# Altium footprint library QuarterBridge_verL.PcbLib: 15 footprints
Each footprint in its own frame and in the unit in brackets; x right, y up, seen from the top. Pads: shape width x height; smd on the part's side, far side on the other; paste and mask are expansions set on the pad; w line width, h text height; cw(c..) or ccw(c..) is an arc to the next point about the centre after c.
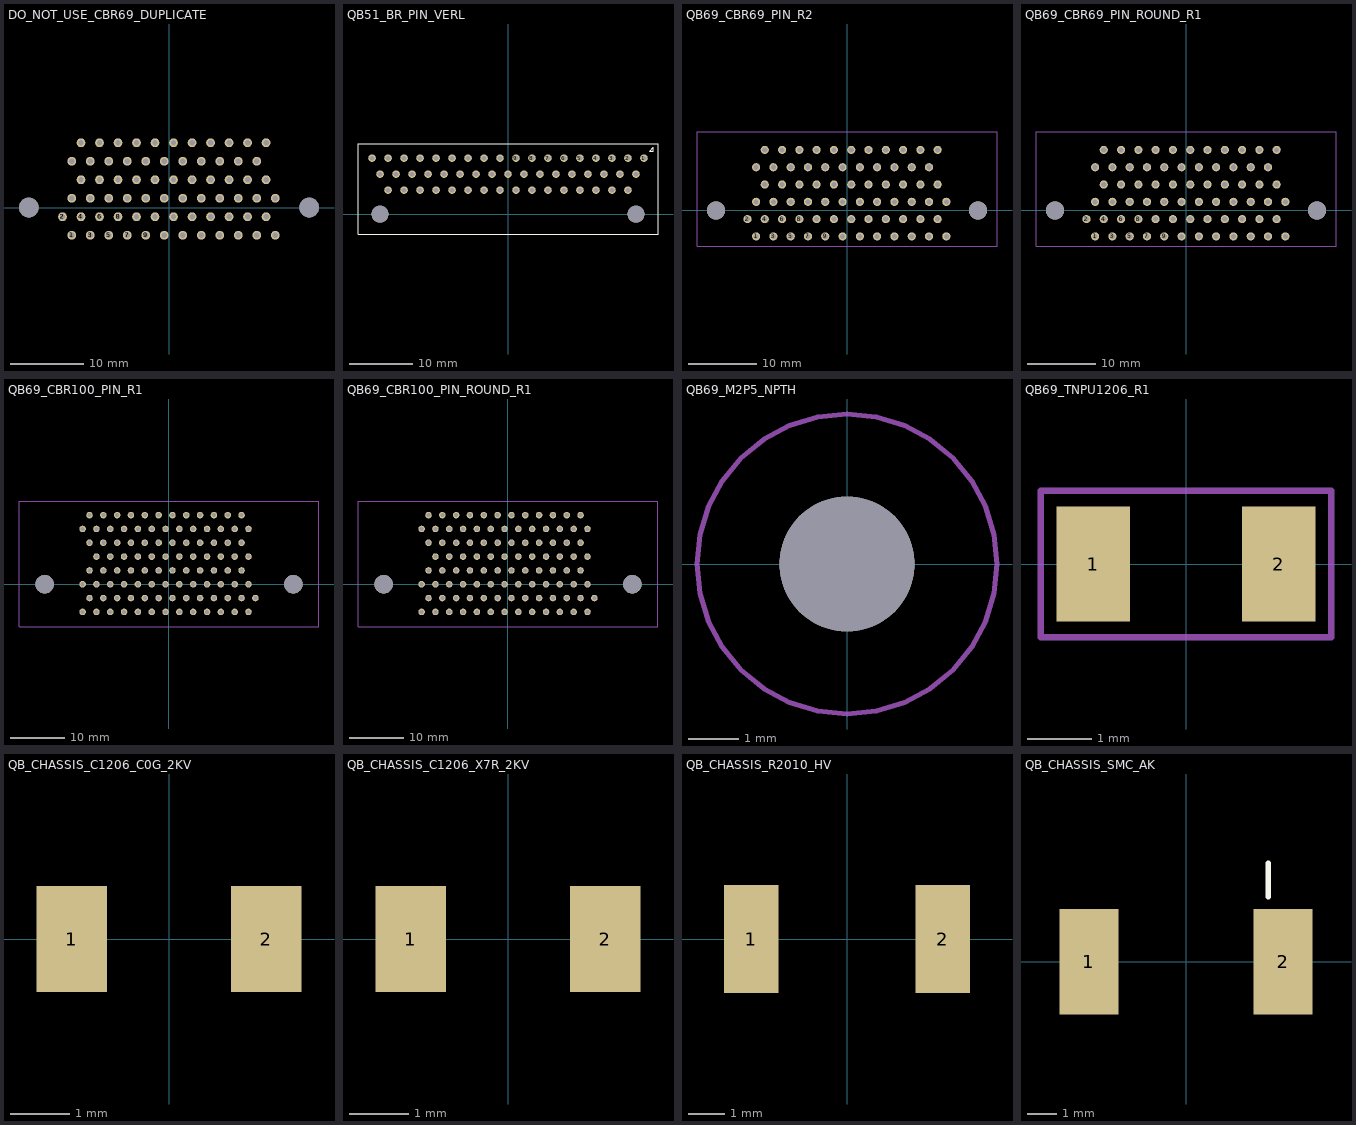
[diagram p0: the footprints below, top view; thin cyan lines are the x and y axes]

## DO_NOT_USE_CBR69_DUPLICATE [mm] "CATALOG PIN draft; component-side view; drill sizes provisional"
pads (142):
  round 1.2 hole 0.75 mask+0.05: 1(-13.35,-3.81) 1(-13.35,-3.81) 2(-14.62,-1.27) 2(-14.62,-1.27) 3(-10.81,-3.81) 3(-10.81,-3.81) 4(-12.08,-1.27) 4(-12.08,-1.27) 5(-8.27,-3.81) 5(-8.27,-3.81) 6(-9.54,-1.27) 6(-9.54,-1.27) 7(-5.73,-3.81) 7(-5.73,-3.81) 8(-7,-1.27) 8(-7,-1.27) 9(-3.19,-3.81) 9(-3.19,-3.81) 10(-4.46,-1.27) 10(-4.46,-1.27) 11(-0.65,-3.81) 11(-0.65,-3.81) 12(-1.92,-1.27) 12(-1.92,-1.27) 13(1.89,-3.81) 13(1.89,-3.81) 14(0.62,-1.27) 14(0.62,-1.27) 15(4.43,-3.81) 15(4.43,-3.81) 16(3.16,-1.27) 16(3.16,-1.27) 17(6.97,-3.81) 17(6.97,-3.81) 18(5.7,-1.27) 18(5.7,-1.27) 19(9.51,-3.81) 19(9.51,-3.81) 20(8.24,-1.27) 20(8.24,-1.27) 21(12.05,-3.81) 21(12.05,-3.81) 22(10.78,-1.27) 22(10.78,-1.27) 23(14.59,-3.81) 23(14.59,-3.81) 24(13.32,-1.27) 24(13.32,-1.27) 25(-13.35,1.27) 25(-13.35,1.27) 26(-12.08,3.81) 26(-12.08,3.81) 27(-10.81,1.27) 27(-10.81,1.27) 28(-9.54,3.81) 28(-9.54,3.81) 29(-8.27,1.27) 29(-8.27,1.27) 30(-7,3.81) 30(-7,3.81) 31(-5.73,1.27) 31(-5.73,1.27) 32(-4.46,3.81) 32(-4.46,3.81) 33(-3.19,1.27) 33(-3.19,1.27) 34(-1.92,3.81) 34(-1.92,3.81) 35(-0.65,1.27) 35(-0.65,1.27) 36(0.62,3.81) 36(0.62,3.81) 37(1.89,1.27) 37(1.89,1.27) 38(3.16,3.81) 38(3.16,3.81) 39(4.43,1.27) 39(4.43,1.27) 40(5.7,3.81) 40(5.7,3.81) 41(6.97,1.27) 41(6.97,1.27) 42(8.24,3.81) 42(8.24,3.81) 43(9.51,1.27) 43(9.51,1.27) 44(10.78,3.81) 44(10.78,3.81) 45(12.05,1.27) 45(12.05,1.27) 46(13.32,3.81) 46(13.32,3.81) 47(14.59,1.27) 47(14.59,1.27) 48(-12.08,8.89) 48(-12.08,8.89) 49(-13.35,6.35) 49(-13.35,6.35) 50(-9.54,8.89) 50(-9.54,8.89) 51(-10.81,6.35) 51(-10.81,6.35) 52(-7,8.89) 52(-7,8.89) 53(-8.27,6.35) 53(-8.27,6.35) 54(-4.46,8.89) 54(-4.46,8.89) 55(-5.73,6.35) 55(-5.73,6.35) 56(-1.92,8.89) 56(-1.92,8.89) 57(-3.19,6.35) 57(-3.19,6.35) 58(0.62,8.89) 58(0.62,8.89) 59(-0.65,6.35) 59(-0.65,6.35) 60(3.16,8.89) 60(3.16,8.89) 61(1.89,6.35) 61(1.89,6.35) 62(5.7,8.89) 62(5.7,8.89) 63(4.43,6.35) 63(4.43,6.35) 64(8.24,8.89) 64(8.24,8.89) 65(6.97,6.35) 65(6.97,6.35) 66(10.78,8.89) 66(10.78,8.89) 67(9.51,6.35) 67(9.51,6.35) 68(13.32,8.89) 68(13.32,8.89) 69(12.05,6.35) 69(12.05,6.35)
  round 2.7 hole 2.7 unplated mask+0: ""(-19.24,0) ""(-19.24,0) ""(19.24,0) ""(19.24,0)

## EMPTY_RESERVED [mm] "Empty placeholder"

## EMPTY_RESERVED_MOUNT [mm] "Empty commit placeholder"

## PCBComponent_1 [mm]

## QB51_BR_PIN_VERL [mm] "BR 51 male M83513/17; 18/17/16 rows; PCB mount pitch40.64mm; per annotated user pattern"
height 8.92
pads (53):
  round 1.2 hole 0.75 mask+0.05: 1(21.59,8.89) 2(19.05,8.89) 3(16.51,8.89) 4(13.97,8.89) 5(11.43,8.89) 6(8.89,8.89) 7(6.35,8.89) 8(3.81,8.89) 9(1.27,8.89) 10(-1.27,8.89) 11(-3.81,8.89) 12(-6.35,8.89) 13(-8.89,8.89) 14(-11.43,8.89) 15(-13.97,8.89) 16(-16.51,8.89) 17(-19.05,8.89) 18(-21.59,8.89) 19(20.32,6.35) 20(17.78,6.35) 21(15.24,6.35) 22(12.7,6.35) 23(10.16,6.35) 24(7.62,6.35) 25(5.08,6.35) 26(2.54,6.35) 27(0,6.35) 28(-2.54,6.35) 29(-5.08,6.35) 30(-7.62,6.35) 31(-10.16,6.35) 32(-12.7,6.35) 33(-15.24,6.35) 34(-17.78,6.35) 35(-20.32,6.35) 36(19.05,3.81) 37(16.51,3.81) 38(13.97,3.81) 39(11.43,3.81) 40(8.89,3.81) 41(6.35,3.81) 42(3.81,3.81) 43(1.27,3.81) 44(-1.27,3.81) 45(-3.81,3.81) 46(-6.35,3.81) 47(-8.89,3.81) 48(-11.43,3.81) 49(-13.97,3.81) 50(-16.51,3.81) 51(-19.05,3.81)
  round 2.7 hole 2.7 unplated mask+0: ""(-20.32,0) ""(20.32,0)
Top Overlay:
  lines w0.12: -23.815,-3.175 -23.815,11.175 23.815,11.175 23.815,-3.175 -23.815,-3.175 ; 22.5,10 23.1,10 23.1,10.6 22.5,10
3D body "QB51_BR_REFERENCE.step": height 8.92, standoff -3.56, extent -23.815,-3.175 23.815,11.175

## QB69_CBR69_PIN_R2 [mm] "PIN component-side draft"
height 8.92
pads (71):
  round 1.2 hole 0.75 mask+0.05: 1(-13.35,-3.81) 2(-14.62,-1.27) 3(-10.81,-3.81) 4(-12.08,-1.27) 5(-8.27,-3.81) 6(-9.54,-1.27) 7(-5.73,-3.81) 8(-7,-1.27) 9(-3.19,-3.81) 10(-4.46,-1.27) 11(-0.65,-3.81) 12(-1.92,-1.27) 13(1.89,-3.81) 14(0.62,-1.27) 15(4.43,-3.81) 16(3.16,-1.27) 17(6.97,-3.81) 18(5.7,-1.27) 19(9.51,-3.81) 20(8.24,-1.27) 21(12.05,-3.81) 22(10.78,-1.27) 23(14.59,-3.81) 24(13.32,-1.27) 25(-13.35,1.27) 26(-12.08,3.81) 27(-10.81,1.27) 28(-9.54,3.81) 29(-8.27,1.27) 30(-7,3.81) 31(-5.73,1.27) 32(-4.46,3.81) 33(-3.19,1.27) 34(-1.92,3.81) 35(-0.65,1.27) 36(0.62,3.81) 37(1.89,1.27) 38(3.16,3.81) 39(4.43,1.27) 40(5.7,3.81) 41(6.97,1.27) 42(8.24,3.81) 43(9.51,1.27) 44(10.78,3.81) 45(12.05,1.27) 46(13.32,3.81) 47(14.59,1.27) 48(-12.08,8.89) 49(-13.35,6.35) 50(-9.54,8.89) 51(-10.81,6.35) 52(-7,8.89) 53(-8.27,6.35) 54(-4.46,8.89) 55(-5.73,6.35) 56(-1.92,8.89) 57(-3.19,6.35) 58(0.62,8.89) 59(-0.65,6.35) 60(3.16,8.89) 61(1.89,6.35) 62(5.7,8.89) 63(4.43,6.35) 64(8.24,8.89) 65(6.97,6.35) 66(10.78,8.89) 67(9.51,6.35) 68(13.32,8.89) 69(12.05,6.35)
  round 2.7 hole 2.7 unplated mask+0: ""(-19.24,0) ""(19.24,0)
Mechanical 13:
  lines w0.12: -22.035,-5.258 22.035,-5.258 22.035,11.56 -22.035,11.56 -22.035,-5.258
3D body "CBR69_PIN_P21_R2.step": height 8.92, standoff -3.56, extent -22.035,-12.34 22.035,11.56

## QB69_CBR69_PIN_ROUND_R1 [mm] "PIN component-side draft"
pads (71):
  round 1.2 hole 0.75 mask+0.05: 1(-13.35,-3.81) 2(-14.62,-1.27) 3(-10.81,-3.81) 4(-12.08,-1.27) 5(-8.27,-3.81) 6(-9.54,-1.27) 7(-5.73,-3.81) 8(-7,-1.27) 9(-3.19,-3.81) 10(-4.46,-1.27) 11(-0.65,-3.81) 12(-1.92,-1.27) 13(1.89,-3.81) 14(0.62,-1.27) 15(4.43,-3.81) 16(3.16,-1.27) 17(6.97,-3.81) 18(5.7,-1.27) 19(9.51,-3.81) 20(8.24,-1.27) 21(12.05,-3.81) 22(10.78,-1.27) 23(14.59,-3.81) 24(13.32,-1.27) 25(-13.35,1.27) 26(-12.08,3.81) 27(-10.81,1.27) 28(-9.54,3.81) 29(-8.27,1.27) 30(-7,3.81) 31(-5.73,1.27) 32(-4.46,3.81) 33(-3.19,1.27) 34(-1.92,3.81) 35(-0.65,1.27) 36(0.62,3.81) 37(1.89,1.27) 38(3.16,3.81) 39(4.43,1.27) 40(5.7,3.81) 41(6.97,1.27) 42(8.24,3.81) 43(9.51,1.27) 44(10.78,3.81) 45(12.05,1.27) 46(13.32,3.81) 47(14.59,1.27) 48(-12.08,8.89) 49(-13.35,6.35) 50(-9.54,8.89) 51(-10.81,6.35) 52(-7,8.89) 53(-8.27,6.35) 54(-4.46,8.89) 55(-5.73,6.35) 56(-1.92,8.89) 57(-3.19,6.35) 58(0.62,8.89) 59(-0.65,6.35) 60(3.16,8.89) 61(1.89,6.35) 62(5.7,8.89) 63(4.43,6.35) 64(8.24,8.89) 65(6.97,6.35) 66(10.78,8.89) 67(9.51,6.35) 68(13.32,8.89) 69(12.05,6.35)
  round 2.7 hole 2.7 unplated mask+0: ""(-19.24,0) ""(19.24,0)
Mechanical 13:
  lines w0.12: -22.035,-5.258 22.035,-5.258 22.035,11.56 -22.035,11.56 -22.035,-5.258
3D body "CBR69_PIN_RoundedR1.step": height 8.92, standoff -3.56, extent -22.035,-12.34 22.035,11.56

## QB69_CBR100_PIN_R1 [mm] "CATALOG PIN draft; component-side view; drill sizes provisional"
height 10.01
pads (102):
  round 1.2 hole 0.75 mask+0.05: 1(-15.875,-5.08) 2(-14.605,-2.54) 3(-13.335,-5.08) 4(-12.065,-2.54) 5(-10.795,-5.08) 6(-9.525,-2.54) 7(-8.255,-5.08) 8(-6.985,-2.54) 9(-5.715,-5.08) 10(-4.445,-2.54) 11(-3.175,-5.08) 12(-1.905,-2.54) 13(-0.635,-5.08) 14(0.635,-2.54) 15(1.905,-5.08) 16(3.175,-2.54) 17(4.445,-5.08) 18(5.715,-2.54) 19(6.985,-5.08) 20(8.255,-2.54) 21(9.525,-5.08) 22(10.795,-2.54) 23(12.065,-5.08) 24(13.335,-2.54) 25(14.605,-5.08) 26(15.875,-2.54) 27(-15.875,0) 28(-14.605,2.54) 29(-13.335,0) 30(-12.065,2.54) 31(-10.795,0) 32(-9.525,2.54) 33(-8.255,0) 34(-6.985,2.54) 35(-5.715,0) 36(-4.445,2.54) 37(-3.175,0) 38(-1.905,2.54) 39(-0.635,0) 40(0.635,2.54) 41(1.905,0) 42(3.175,2.54) 43(4.445,0) 44(5.715,2.54) 45(6.985,0) 46(8.255,2.54) 47(9.525,0) 48(10.795,2.54) 49(12.065,0) 50(13.335,2.54) 51(14.605,0) 52(-14.605,7.62) 53(-13.335,5.08) 54(-12.065,7.62) 55(-10.795,5.08) 56(-9.525,7.62) 57(-8.255,5.08) 58(-6.985,7.62) 59(-5.715,5.08) 60(-4.445,7.62) 61(-3.175,5.08) 62(-1.905,7.62) 63(-0.635,5.08) 64(0.635,7.62) 65(1.905,5.08) 66(3.175,7.62) 67(4.445,5.08) 68(5.715,7.62) 69(6.985,5.08) 70(8.255,7.62) 71(9.525,5.08) 72(10.795,7.62) 73(12.065,5.08) 74(13.335,7.62) 75(14.605,5.08) 76(-15.875,10.16) 77(-14.605,12.7) 78(-13.335,10.16) 79(-12.065,12.7) 80(-10.795,10.16) 81(-9.525,12.7) 82(-8.255,10.16) 83(-6.985,12.7) 84(-5.715,10.16) 85(-4.445,12.7) 86(-3.175,10.16) 87(-1.905,12.7) 88(-0.635,10.16) 89(0.635,12.7) 90(1.905,10.16) 91(3.175,12.7) 92(4.445,10.16) 93(5.715,12.7) 94(6.985,10.16) 95(8.255,12.7) 96(9.525,10.16) 97(10.795,12.7) 98(12.065,10.16) 99(13.335,12.7) 100(14.605,10.16)
  round 3.4 hole 3.4 unplated mask+0: ""(-22.86,0) ""(22.86,0)
Mechanical 13:
  lines w0.12: -27.56,-7.798 -27.56,15.24 27.56,15.24 27.56,-7.798 -27.56,-7.798
3D body "CBR100_PIN_P21_R2.step": height 10.01, standoff -3.56, extent -27.56,-14.88 27.56,15.24

## QB69_CBR100_PIN_ROUND_R1 [mm] "CATALOG PIN draft; component-side view; drill sizes provisional"
pads (102):
  round 1.2 hole 0.75 mask+0.05: 1(-15.875,-5.08) 2(-14.605,-2.54) 3(-13.335,-5.08) 4(-12.065,-2.54) 5(-10.795,-5.08) 6(-9.525,-2.54) 7(-8.255,-5.08) 8(-6.985,-2.54) 9(-5.715,-5.08) 10(-4.445,-2.54) 11(-3.175,-5.08) 12(-1.905,-2.54) 13(-0.635,-5.08) 14(0.635,-2.54) 15(1.905,-5.08) 16(3.175,-2.54) 17(4.445,-5.08) 18(5.715,-2.54) 19(6.985,-5.08) 20(8.255,-2.54) 21(9.525,-5.08) 22(10.795,-2.54) 23(12.065,-5.08) 24(13.335,-2.54) 25(14.605,-5.08) 26(15.875,-2.54) 27(-15.875,0) 28(-14.605,2.54) 29(-13.335,0) 30(-12.065,2.54) 31(-10.795,0) 32(-9.525,2.54) 33(-8.255,0) 34(-6.985,2.54) 35(-5.715,0) 36(-4.445,2.54) 37(-3.175,0) 38(-1.905,2.54) 39(-0.635,0) 40(0.635,2.54) 41(1.905,0) 42(3.175,2.54) 43(4.445,0) 44(5.715,2.54) 45(6.985,0) 46(8.255,2.54) 47(9.525,0) 48(10.795,2.54) 49(12.065,0) 50(13.335,2.54) 51(14.605,0) 52(-14.605,7.62) 53(-13.335,5.08) 54(-12.065,7.62) 55(-10.795,5.08) 56(-9.525,7.62) 57(-8.255,5.08) 58(-6.985,7.62) 59(-5.715,5.08) 60(-4.445,7.62) 61(-3.175,5.08) 62(-1.905,7.62) 63(-0.635,5.08) 64(0.635,7.62) 65(1.905,5.08) 66(3.175,7.62) 67(4.445,5.08) 68(5.715,7.62) 69(6.985,5.08) 70(8.255,7.62) 71(9.525,5.08) 72(10.795,7.62) 73(12.065,5.08) 74(13.335,7.62) 75(14.605,5.08) 76(-15.875,10.16) 77(-14.605,12.7) 78(-13.335,10.16) 79(-12.065,12.7) 80(-10.795,10.16) 81(-9.525,12.7) 82(-8.255,10.16) 83(-6.985,12.7) 84(-5.715,10.16) 85(-4.445,12.7) 86(-3.175,10.16) 87(-1.905,12.7) 88(-0.635,10.16) 89(0.635,12.7) 90(1.905,10.16) 91(3.175,12.7) 92(4.445,10.16) 93(5.715,12.7) 94(6.985,10.16) 95(8.255,12.7) 96(9.525,10.16) 97(10.795,12.7) 98(12.065,10.16) 99(13.335,12.7) 100(14.605,10.16)
  round 3.4 hole 3.4 unplated mask+0: ""(-22.86,0) ""(22.86,0)
Mechanical 13:
  lines w0.12: -27.56,-7.798 27.56,-7.798 27.56,15.24 -27.56,15.24 -27.56,-7.798
3D body "CBR100_PIN_RoundedR1.step": height 10.01, standoff -3.56, extent -27.56,-14.88 27.56,15.24

## QB69_M2P5_NPTH [mm] "M2.5 NPTH 2.7mm, 6mm tool envelope"
pads (1):
  round 2.7 hole 2.7 unplated mask+0: ""(0,0)
Mechanical 1:
  lines w0.1: -3,0 -2.942,0.585 ; -3,0 -2.942,-0.585 ; -3,0 -2.942,0.585 ; -3,0 -2.942,-0.585 ; -2.942,-0.585 -2.772,-1.148 ; -2.942,-0.585 -2.772,-1.148 ; -2.942,0.585 -2.772,1.148 ; -2.942,0.585 -2.772,1.148 ; -2.772,-1.148 -2.494,-1.667 ; -2.772,-1.148 -2.494,-1.667 ; -2.772,1.148 -2.494,1.667 ; -2.772,1.148 -2.494,1.667 ; -2.494,-1.667 -2.121,-2.121 ; -2.494,-1.667 -2.121,-2.121 ; -2.494,1.667 -2.121,2.121 ; -2.494,1.667 -2.121,2.121 ; -2.121,-2.121 -1.667,-2.494 ; -2.121,-2.121 -1.667,-2.494 ; -2.121,2.121 -1.667,2.494 ; -2.121,2.121 -1.667,2.494 ; -1.667,-2.494 -1.148,-2.772 ; -1.667,-2.494 -1.148,-2.772 ; -1.667,2.494 -1.148,2.772 ; -1.667,2.494 -1.148,2.772 ; -1.148,-2.772 -0.585,-2.942 ; -1.148,-2.772 -0.585,-2.942 ; -1.148,2.772 -0.585,2.942 ; -1.148,2.772 -0.585,2.942 ; -0.585,-2.942 0,-3 ; -0.585,-2.942 0,-3 ; -0.585,2.942 0,3 ; -0.585,2.942 0,3 ; 0,-3 0.585,-2.942 ; 0,-3 0.585,-2.942 ; 0,3 0.585,2.942 ; 0,3 0.585,2.942 ; 0.585,-2.942 1.148,-2.772 ; 0.585,-2.942 1.148,-2.772 ; 0.585,2.942 1.148,2.772 ; 0.585,2.942 1.148,2.772 ; 1.148,-2.772 1.667,-2.494 ; 1.148,-2.772 1.667,-2.494 ; 1.148,2.772 1.667,2.494 ; 1.148,2.772 1.667,2.494 ; 1.667,-2.494 2.121,-2.121 ; 1.667,-2.494 2.121,-2.121 ; 1.667,2.494 2.121,2.121 ; 1.667,2.494 2.121,2.121 ; 2.121,-2.121 2.494,-1.667 ; 2.121,-2.121 2.494,-1.667 ; 2.121,2.121 2.494,1.667 ; 2.121,2.121 2.494,1.667 ; 2.494,-1.667 2.772,-1.148 ; 2.494,-1.667 2.772,-1.148 ; 2.494,1.667 2.772,1.148 ; 2.494,1.667 2.772,1.148 ; 2.772,-1.148 2.942,-0.585 ; 2.772,-1.148 2.942,-0.585 ; 2.772,1.148 2.942,0.585 ; 2.772,1.148 2.942,0.585 ; 2.942,-0.585 3,0 ; 2.942,-0.585 3,0 ; 2.942,0.585 3,0 ; 2.942,0.585 3,0

## QB69_TNPU1206_R1 [mm] "Vishay doc28950 p1 IPC7351 reflow 1206; G1.75 Y1.15 X1.80 Z4.05 mm"
pads (2):
  rect 1.15x1.8 smd: 1(-1.45,0) 2(1.45,0)
Mechanical 1:
  lines w0.102: -2.275,-1.15 -2.275,1.15 2.275,1.15 2.275,-1.15 -2.275,-1.15
3D body "TNPU1206_reference.step": height 0.55, standoff 0, extent -1.6,-0.8 1.6,0.8

## QB_CHASSIS_C1206_C0G_2KV [mm] "KEMET individual specsheet; maximum package dimensions; designer HV lands have 2.1mm inner copper gap."
height 1.35
pads (2):
  rect 1.2x1.8 smd paste+0 mask+0.05: 1(-1.65,0) 2(1.65,0)
3D body "QB_CHASSIS_C1206_C0G_2KV_reference.step": height 1.35, standoff 0, extent -1.7,-0.9 1.7,0.9

## QB_CHASSIS_C1206_X7R_2KV [mm] "KEMET individual specsheet; maximum package dimensions; designer HV lands have 2.1mm inner copper gap."
height 1.75
pads (2):
  rect 1.2x1.8 smd paste+0 mask+0.05: 1(-1.65,0) 2(1.65,0)
3D body "QB_CHASSIS_C1206_X7R_2KV_vendor_aligned.step": height 1.75, standoff 0, extent -1.7,-0.9 1.7,0.9

## QB_CHASSIS_R2010_HV [mm] "Bourns CHV datasheet; 2010 0.5W voltage ceiling 2kV; continuous 2kV at 2M would require 2W and is NOT qualified."
height 0.7
pads (2):
  rect 1.5x3 smd paste+0 mask+0.05: 1(-2.65,0) 2(2.65,0)
3D body "QB_CHASSIS_R2010_HV_vendor_aligned.step": height 0.6, standoff 0, extent -2.5,-1.25 2.5,1.25

## QB_CHASSIS_SMC_AK [mm] "Vishay document88394; pin1=Anode, pin2=Cathode. Land gap4.6mm, lands2x3.6mm."
height 2.62
pads (2):
  rect 2x3.6 smd paste+0 mask+0.05: 1(-3.3,0) 2(3.3,0)
Top Overlay:
  lines w0.18: 2.8,2.2 2.8,3.35
3D body "QB_CHASSIS_SMC_AK_vendor_aligned.step": height 2.26, standoff 0, extent -3.949,-2.95 3.949,2.95